# EAGLE library part PN532-NFC-MODULE (library moto-safety)
PN532-NFC-MODULE PN532 NFC V3 karti (kirmizi). I2C/HSU 4-pin + SPI 8-pin header. Kart: 43.0 x 41.0 mm - Guven: M STEP: GrabCAD 'PN532 NFC module V3'
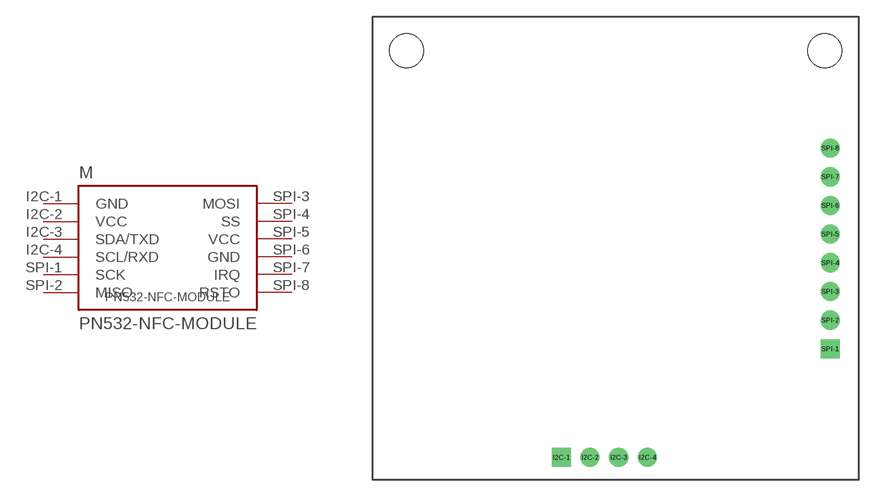
[diagram p0: symbol with the pads of PN532-NFC-MODULE; footprint PN532-NFC-MODULE]

Designator prefix M

## PN532-NFC-MODULE (BOARD_SIZE: 43.0x41.0mm; CONFIDENCE: M)  [PN532-NFC-MODULE]
I2C-1  GND  pas
I2C-2  VCC  pas
I2C-3  SDA/TXD  pas
I2C-4  SCL/RXD  pas
SPI-1  SCK  pas
SPI-2  MISO  pas
SPI-3  MOSI  pas
SPI-4  SS  pas
SPI-5  VCC  pas
SPI-6  GND  pas
SPI-7  IRQ  pas
SPI-8  RSTO  pas

## Footprint PN532-NFC-MODULE (pad centres in mm)
PN532 NFC V3 karti (kirmizi). I2C/HSU 4-pin + SPI 8-pin header. | Kart: 43.0 x 41.0 mm | Guven: M
drill 1 pad 1.7 square: I2C-1 -4.81,-18.5; SPI-1 19,-8.89
drill 1 pad 1.7 round: I2C-2 -2.27,-18.5; I2C-3 0.27,-18.5; I2C-4 2.81,-18.5; SPI-2 19,-6.35; SPI-3 19,-3.81; SPI-4 19,-1.27; SPI-5 19,1.27; SPI-6 19,3.81; SPI-7 19,6.35; SPI-8 19,8.89
hole 3 at -18.5,17.5
hole 3 at 18.5,17.5